# Altium schematic symbol library AK5538VN.SchLib: 1 symbol
Pins are listed as number, name and electrical type; pins without a type are passive.

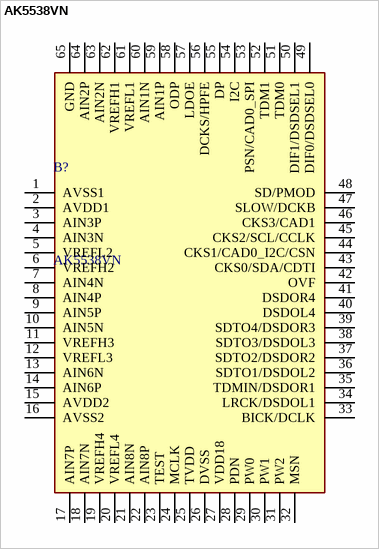
[diagram p0: symbol AK5538VN]

## AK5538VN
designator B?
ADC, Audio 32 b 768k DSD, PCM 64-QFN (9x9); Manufacturer_Name: Asahi Kasei Microdevices; Geometry.Height: 1mm; Mouser Part Number: 412-AK5538VN; Mouser Price/Stock: https://www.mouser.co.uk/ProductDetail/Asahi-Kasei-Microdevices/AK5538VN?qs=vvQtp7zwQdPIrFHV6bIVJQ%3D%3D; Manufacturer_Part_Number: AK5538VN; Datasheet Link: https://www.akm.com/content/dam/documents/products/audio/audio-adc/ak5538vn/ak5538vn-en-datasheet.pdf
footprint QFN50P900X900X100-65N
pins: 1 AVSS1, 2 AVDD1, 3 AIN3P, 4 AIN3N, 5 VREFL2, 6 VREFH2, 7 AIN4N, 8 AIN4P, 9 AIN5P, 10 AIN5N, 11 VREFH3, 12 VREFL3, 13 AIN6N, 14 AIN6P, 15 AVDD2, 16 AVSS2, 17 AIN7P, 18 AIN7N, 19 VREFH4, 20 VREFL4, 21 AIN8N, 22 AIN8P, 23 TEST, 24 MCLK, 25 TVDD, 26 DVSS, 27 VDD18, 28 PDN, 29 PW0, 30 PW1, 31 PW2, 32 MSN, 33 BICK/DCLK, 34 LRCK/DSDOL1, 35 TDMIN/DSDOR1, 36 SDTO1/DSDOL2, 37 SDTO2/DSDOR2, 38 SDTO3/DSDOL3, 39 SDTO4/DSDOR3, 40 DSDOL4, 41 DSDOR4, 42 OVF, 43 CKS0/SDA/CDTI, 44 CKS1/CAD0_I2C/CSN, 45 CKS2/SCL/CCLK, 46 CKS3/CAD1, 47 SLOW/DCKB, 48 SD/PMOD, 49 DIF0/DSDSEL0, 50 DIF1/DSDSEL1, 51 TDM0, 52 TDM1, 53 PSN/CAD0_SPI, 54 I2C, 55 DP, 56 DCKS/HPFE, 57 LDOE, 58 ODP, 59 AIN1P, 60 AIN1N, 61 VREFL1, 62 VREFH1, 63 AIN2N, 64 AIN2P, 65 GND